# Altium footprint library SamacSys.PcbLib: 1008 footprints (part 21 of 63)
Each footprint in its own frame and in the unit in brackets; x right, y up, seen from the top. Pads: shape width x height; smd on the part's side, far side on the other; paste and mask are expansions set on the pad; w line width, h text height; cw(c..) or ccw(c..) is an arc to the next point about the centre after c.
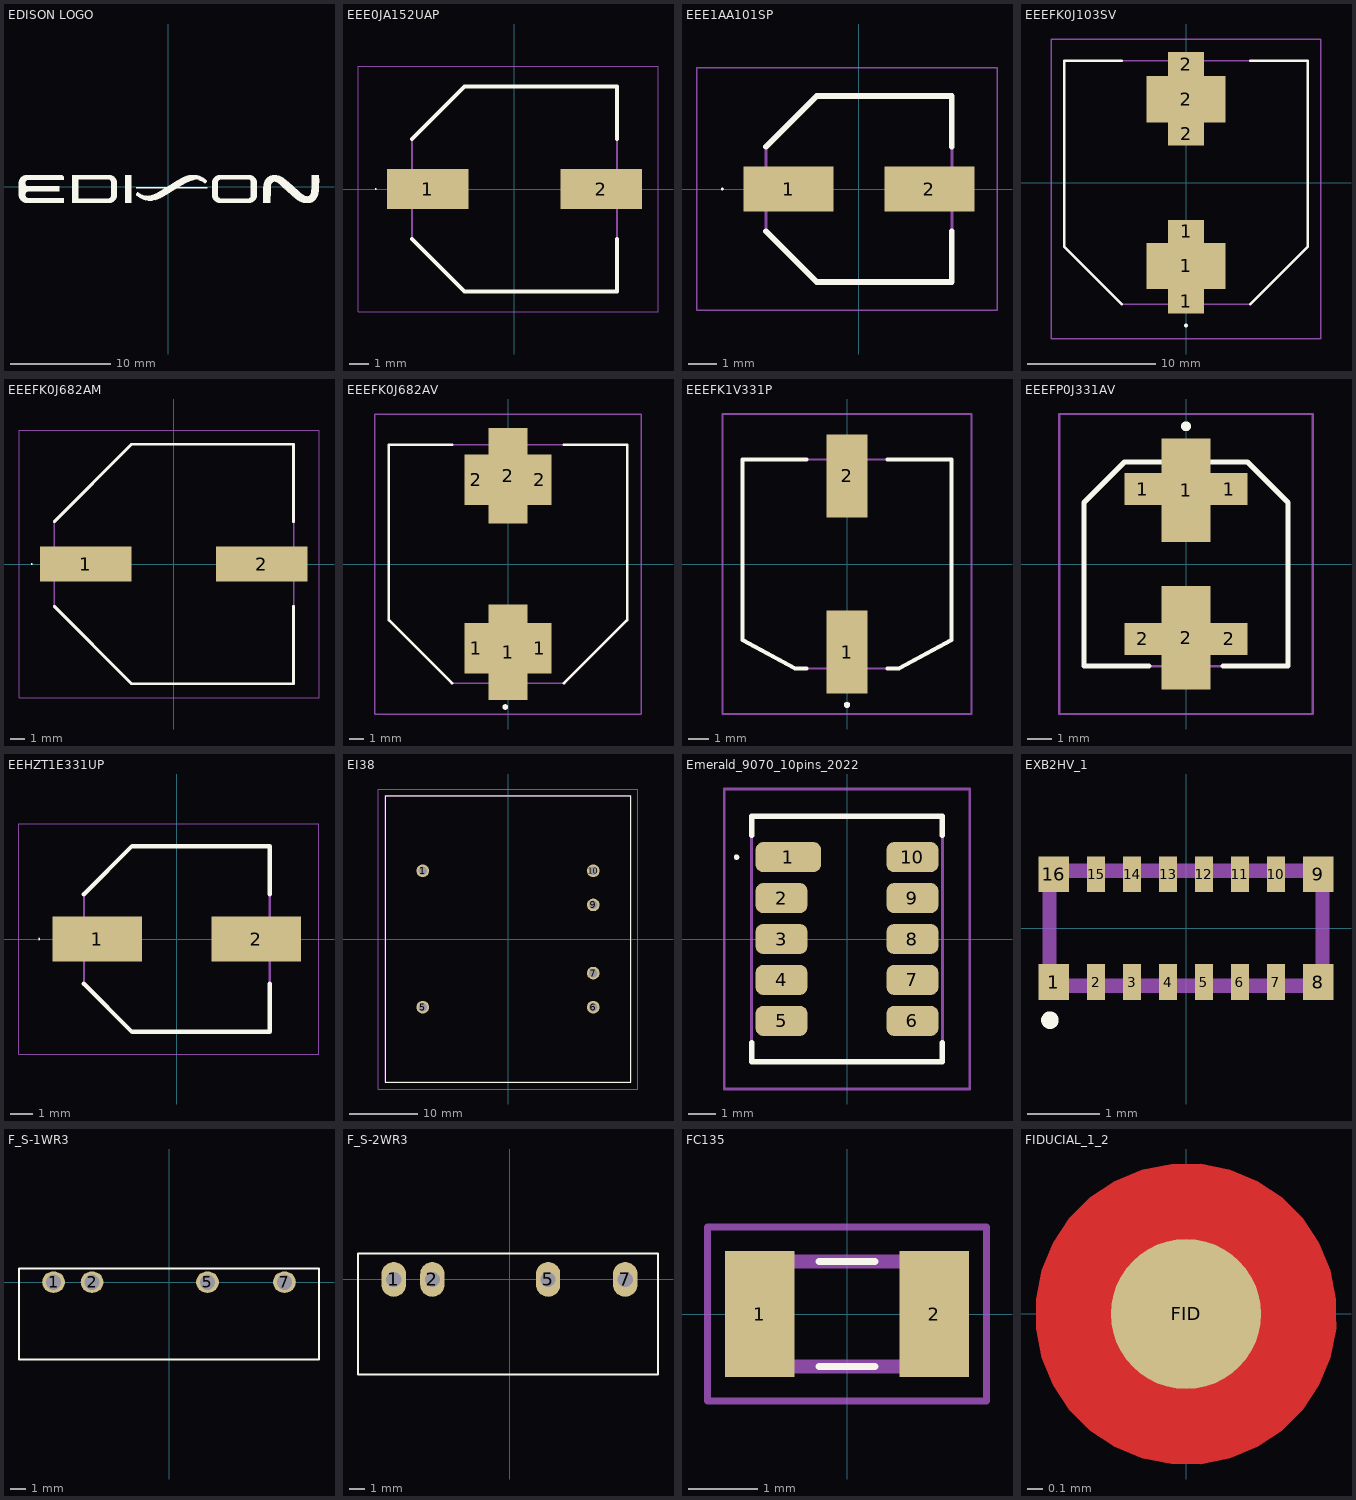
[diagram p20: the footprints below, top view; thin cyan lines are the x and y axes]

## EDISON LOGO [mm]
Top Overlay:
  drawing of 6 lines, arcs and shapes, not listed

## EEE0JA152UAP [mm]
pads (2):
  rect 4.1x2 smd: 1(-4.35,0) 2(4.35,0)
Top Overlay:
  lines w0.05: -6.975,0 cw(c-6.95,0) -6.925,0 cw(c-6.95,0) -6.975,0
  lines w0.2: -5.15,-2.5 -2.5,-5.15 5.15,-5.15 5.15,-2.5 ; -5.15,2.5 -2.5,5.15 5.15,5.15 5.15,2.5
Assembly:
  lines w0.1: -5.15,2.5 -2.5,5.15 ; -5.15,2.5 -5.15,-2.5 -2.5,-5.15 5.15,-5.15 5.15,5.15 -2.5,5.15 ; -5.15,2.5 -2.5,5.15
Countryard:
  lines w0.05: -7.85,-6.15 -7.85,6.15 7.2,6.15 7.2,-6.15 -7.85,-6.15
3D body "EEE-FK1V471SP.stp": height 10.2, standoff 0, extent -5.85,-5.15 5.85,5.15

## EEE1AA101SP [mm]
pads (2):
  rect 3.2x1.6 smd: 1(-2.5,0) 2(2.5,0)
Top Overlay:
  lines w0.05: -4.875,0 cw(c-4.85,0) -4.825,0 cw(c-4.85,0) -4.875,0
  lines w0.2: -3.3,-1.5 -1.5,-3.3 3.3,-3.3 3.3,-1.5 ; -3.3,1.5 -1.5,3.3 3.3,3.3 3.3,1.5
Assembly:
  lines w0.1: -3.3,1.5 -1.5,3.3 ; -3.3,1.5 -3.3,-1.5 -1.5,-3.3 3.3,-3.3 3.3,3.3 -1.5,3.3 ; -3.3,1.5 -1.5,3.3
Countryard:
  lines w0.05: -5.75,-4.3 -5.75,4.3 4.9,4.3 4.9,-4.3 -5.75,-4.3
3D body "EEE-FT1H470AP.stp": height 5.8, standoff 0, extent -3.65,-3.3 3.65,3.3

## EEEFK0J103SV [mm]
pads (6):
  rect 2.8x1.9 smd: 1(0,-9.25) 2(0,9.25)
  rect 6.2x3.6 smd: 1(0,-6.5) 2(0,6.5)
  rect 2.8x1.8 smd: 1(0,-3.8) 2(0,3.8)
Top Overlay:
  lines w0.2: -5,-9.5 -9.5,-5 -9.5,9.5 -5,9.5 ; 5,-9.5 9.5,-5 9.5,9.5 5,9.5 ; 0,-11.2 cw(c0,-11.15) 0,-11.1 ; 0,-11.2 ccw(c0,-11.15) 0,-11.1 ; 0,-11.2 cw(c0,-11.15) 0,-11.1
Assembly:
  lines w0.1: -9.5,-5 -5,-9.5 ; -9.5,-5 -9.5,9.5 9.5,9.5 9.5,-5 5,-9.5 -5,-9.5 ; -9.5,-5 -5,-9.5
Countryard:
  lines w0.1: -10.5,-12.2 10.5,-12.2 10.5,11.2 -10.5,11.2 -10.5,-12.2
3D body "EEV-FK2A221V.stp": height 16.98, standoff 0.18, extent -9.5,-10.2 9.5,10.2

## EEEFK0J682AM [mm]
pads (2):
  rect 6.5x2.5 smd: 1(-6.25,0) 2(6.25,0)
Top Overlay:
  lines w0.05: -10.125,0 cw(c-10.1,0) -10.075,0 cw(c-10.1,0) -10.125,0
  lines w0.2: -8.5,-3 -3,-8.5 8.5,-8.5 8.5,-3 ; -8.5,3 -3,8.5 8.5,8.5 8.5,3
Assembly:
  lines w0.1: -8.5,3 -3,8.5 ; -8.5,3 -8.5,-3 -3,-8.5 8.5,-8.5 8.5,8.5 -3,8.5 ; -8.5,3 -3,8.5
Countryard:
  lines w0.05: -11,-9.5 -11,9.5 10.3,9.5 10.3,-9.5 -11,-9.5
3D body "EEE-TK2A101AM.stp": height 16.5, standoff 0, extent -9.2,-8.5 9.2,8.5

## EEEFK0J682AV [mm]
pads (6):
  rect 1.7x3.6 smd: 1(-2.25,-6) 1(2.25,-6) 2(-2.25,6) 2(2.25,6)
  rect 2.8x6.8 smd: 1(0,-6.3) 2(0,6.3)
Top Overlay:
  lines w0.2: -4,-8.5 -8.5,-4 -8.5,8.5 -4,8.5 ; 4,-8.5 8.5,-4 8.5,8.5 4,8.5 ; -0.3,-10.2 ccw(c-0.2,-10.2) -0.1,-10.2 ccw(c-0.2,-10.2) -0.3,-10.2
Assembly:
  lines w0.1: -8.5,-4 -4,-8.5 ; -8.5,-4 -8.5,8.5 8.5,8.5 8.5,-4 4,-8.5 -4,-8.5 ; -8.5,-4 -4,-8.5
Countryard:
  lines w0.1: -9.5,-10.7 -9.5,10.7 9.5,10.7 9.5,-10.7 -9.5,-10.7
3D body "EEV-FK2A101V.stp": height 16.8, standoff 0, extent -8.5,-9.2 8.5,9.2

## EEEFK1V331P [mm]
pads (2):
  rect 2x4.1 smd: 1(0,-4.35) 2(0,4.35)
Top Overlay:
  lines w0.2: -2,-5.15 -2.575,-5.15 -5.15,-3.75 -5.15,5.15 -2,5.15 ; 2,-5.15 2.575,-5.15 5.15,-3.75 5.15,5.15 2,5.15 ; 0,-7 cw(c0,-6.95) 0,-6.9 ; 0,-7 ccw(c0,-6.95) 0,-6.9 ; 0,-7 cw(c0,-6.95) 0,-6.9
Assembly:
  lines w0.1: -5.15,-3.75 -2.575,-5.15 2.575,-5.15 5.15,-3.75 5.15,5.15 -5.15,5.15 -5.15,-3.75
Countryard:
  lines w0.1: -6.15,-7.4 -6.15,7.4 6.15,7.4 6.15,-7.4 -6.15,-7.4
3D body "EEE-FK1E471P.stp": height 10.2, standoff 0, extent -5.15,-5.85 5.15,5.85

## EEEFP0J331AV [mm]
pads (6):
  rect 1.5x1.3 smd: 1(-1.75,3.05) 1(1.75,3.05) 2(-1.75,-3.05) 2(1.75,-3.05)
  rect 2x4.2 smd: 1(0,3) 2(0,-3)
Top Overlay:
  lines w0.2: -1.5,-4.15 -4.15,-4.15 -4.15,2.5 -2.5,4.15 2.5,4.15 4.15,2.5 4.15,-4.15 1.5,-4.15 ; -0.1,5.6 cw(c0,5.6) 0.1,5.6 cw(c0,5.6) -0.1,5.6
Assembly:
  lines w0.1: -4.15,-4.15 -4.15,2.5 -2.5,4.15 2.5,4.15 4.15,2.5 4.15,-4.15 -4.15,-4.15
Countryard:
  lines w0.1: -5.15,-6.1 -5.15,6.1 5.15,6.1 5.15,-6.1 -5.15,-6.1
3D body "EEE-FK1H470V.stp": height 6.5, standoff 0, extent -4.15,-4.5 4.15,4.5

## EEHZT1E331UP [mm]
pads (2):
  rect 4x2 smd: 1(-3.55,0) 2(3.55,0)
Top Overlay:
  lines w0.05: -6.175,0 ccw(c-6.15,0) -6.125,0 ccw(c-6.15,0) -6.175,0
  lines w0.2: -4.15,-2 -2,-4.15 4.15,-4.15 4.15,-2 ; -4.15,2 -2,4.15 4.15,4.15 4.15,2
Assembly:
  lines w0.1: -4.15,2 -2,4.15 ; -4.15,2 -4.15,-2 -2,-4.15 4.15,-4.15 4.15,4.15 -2,4.15 ; -4.15,2 -2,4.15
Countryard:
  lines w0.05: -7.05,-5.15 6.35,-5.15 6.35,5.15 -7.05,5.15 -7.05,-5.15
3D body "EEE-1JA470UP.stp": height 10.2, standoff 0, extent -4.79,-4.15 4.91,4.15

## EI38 [mm]
pads (6):
  round 1.86 hole 1.24: 1(-12.5,10) 5(-12.5,-10) 6(12.5,-10) 7(12.5,-5) 9(12.5,5) 10(12.5,10)
Top Overlay:
  lines w0.1: -18,-21 -18,21 18,21 18,-21 -18,-21
Assembly:
  lines w0.2: -18,-21 -18,21 18,21 18,-21 -18,-21
Countryard:
  lines w0.1: -19,-22 -19,22 19,22 19,-22 -19,-22
3D body "Деталь1.STEP": height 29, standoff -4, extent -17.75,-21 17.75,21

## Emerald_9070_10pins_2022 [mm]
pads (10):
  rrect50% 2.4x1.1 smd: 1(-2.15,3)
  rrect50% 1.9x1.1 smd: 2(-2.4,1.5) 3(-2.4,0) 4(-2.4,-1.5) 5(-2.4,-3) 6(2.4,-3) 7(2.4,-1.5) 8(2.4,0) 9(2.4,1.5) 10(2.4,3)
Top Overlay:
  lines w0.1: -4.1,3 cw(c-4.05,3) -4,3 cw(c-4.05,3) -4.1,3
  lines w0.2: -3.5,-3.8 -3.5,-4.5 3.5,-4.5 3.5,-3.8 ; -3.5,3.8 -3.5,4.5 3.5,4.5 3.5,3.8
Assembly:
  lines w0.1: -3.5,-4.5 -3.5,4.5 3.5,4.5 3.5,-4.5 -3.5,-4.5
Countryard:
  lines w0.1: -4.5,-5.5 -4.5,5.5 4.5,5.5 4.5,-5.5 -4.5,-5.5
3D body "Emerald9x7mm.stp": height 6.41, standoff 0.07, extent -3.502,-4.5 3.5,4.5

## EXB2HV_1 [mm]
pads (16):
  rect 0.425x0.5 smd: 1(-1.837,-0.75) 8(1.837,-0.75) 9(1.837,0.75) 16(-1.837,0.75)
  rect 0.25x0.5 smd: 2(-1.25,-0.75) 3(-0.75,-0.75) 4(-0.25,-0.75) 5(0.25,-0.75) 6(0.75,-0.75) 7(1.25,-0.75) 10(1.25,0.75) 11(0.75,0.75) 12(0.25,0.75) 13(-0.25,0.75) 14(-0.75,0.75) 15(-1.25,0.75)
Top Overlay:
  circle w0.2: c-1.893,-1.28 r0.022
Assembly:
  lines w0.2: -1.9,-0.8 -1.9,0.8 1.9,0.8 1.9,-0.8 -1.9,-0.8
3D body "EXB-2HV330JV.stp": height 0.55, standoff 0, extent -1.95,-0.9 1.95,0.9

## F_S-1WR3 [mm]
height 10.16
pads (4):
  oval 1.5x1.4 hole 1: 1(-7.62,0) 2(-5.08,0) 5(2.54,0) 7(7.62,0)
Top Overlay:
  lines w0.127: -9.9,-5.1 -9.9,0.9 9.9,0.9 9.9,-5.1 -9.9,-5.1
3D body "F_S-1WR3.stp": height 10.16, standoff -4.1, extent -9.825,-5.1 9.825,0.9

## F_S-2WR3 [mm]
pads (4):
  oval 1.6x2.3 hole 1: 1(-7.62,0) 2(-5.08,0) 5(2.54,0) 7(7.62,0)
Top Overlay:
  lines w0.127: -9.975,-6.263 -9.975,1.7 9.777,1.7 9.777,-6.263 -9.975,-6.263
3D body "F_S-2WR3.stp": height 10.16, standoff -4.1, extent -9.943,-6.178 9.707,0.872

## FC135 [mm]
pads (2):
  rect 1x1.8 smd: 1(-1.25,0) 2(1.25,0)
Top Overlay:
  lines w0.1: -0.4,-0.75 0.4,-0.75 ; -0.4,0.75 0.4,0.75
Assembly:
  lines w0.2: -1.6,-0.75 -1.6,0.75 1.6,0.75 1.6,-0.75 -1.6,-0.75
Countryard:
  lines w0.1: -2,-1.25 -2,1.25 2,1.25 2,-1.25 -2,-1.25
3D body "FC-135_32.7680KA-A0.stp": height 0.9, standoff 0, extent -1.6,-0.75 1.6,0.75

## FIDUCIAL_1_2 [mm] "Fiducial point Small IN 1mm OUT 2mm"
pads (1):
  round 1 smd paste-2 mask+0.5: FID(0,0)
Top Layer:
  pour cut-out: 0,-1 -0.098,-1 -0.292,-0.962 -0.474,-0.886 -0.637,-0.777 -0.777,-0.637 -0.886,-0.474 -0.962,-0.292 -1,-0.099 -1,0 -1,0.098 -0.962,0.292 -0.886,0.474 -0.777,0.637 -0.637,0.777 -0.474,0.886 -0.292,0.962 -0.099,1 0,1 0.098,1 0.292,0.962 0.474,0.886 0.637,0.777 0.777,0.637 0.886,0.474 0.962,0.292 1,0.098 1,0 1,-0.098 0.962,-0.292 0.886,-0.474 0.777,-0.637 0.637,-0.777 0.474,-0.886 0.292,-0.962 0.098,-1